# Altium footprint library PcbLib1.PcbLib: 23 footprints (part 2 of 2)
Each footprint in its own frame and in the unit in brackets; x right, y up, seen from the top. Pads: shape width x height; smd on the part's side, far side on the other; paste and mask are expansions set on the pad; w line width, h text height; cw(c..) or ccw(c..) is an arc to the next point about the centre after c.
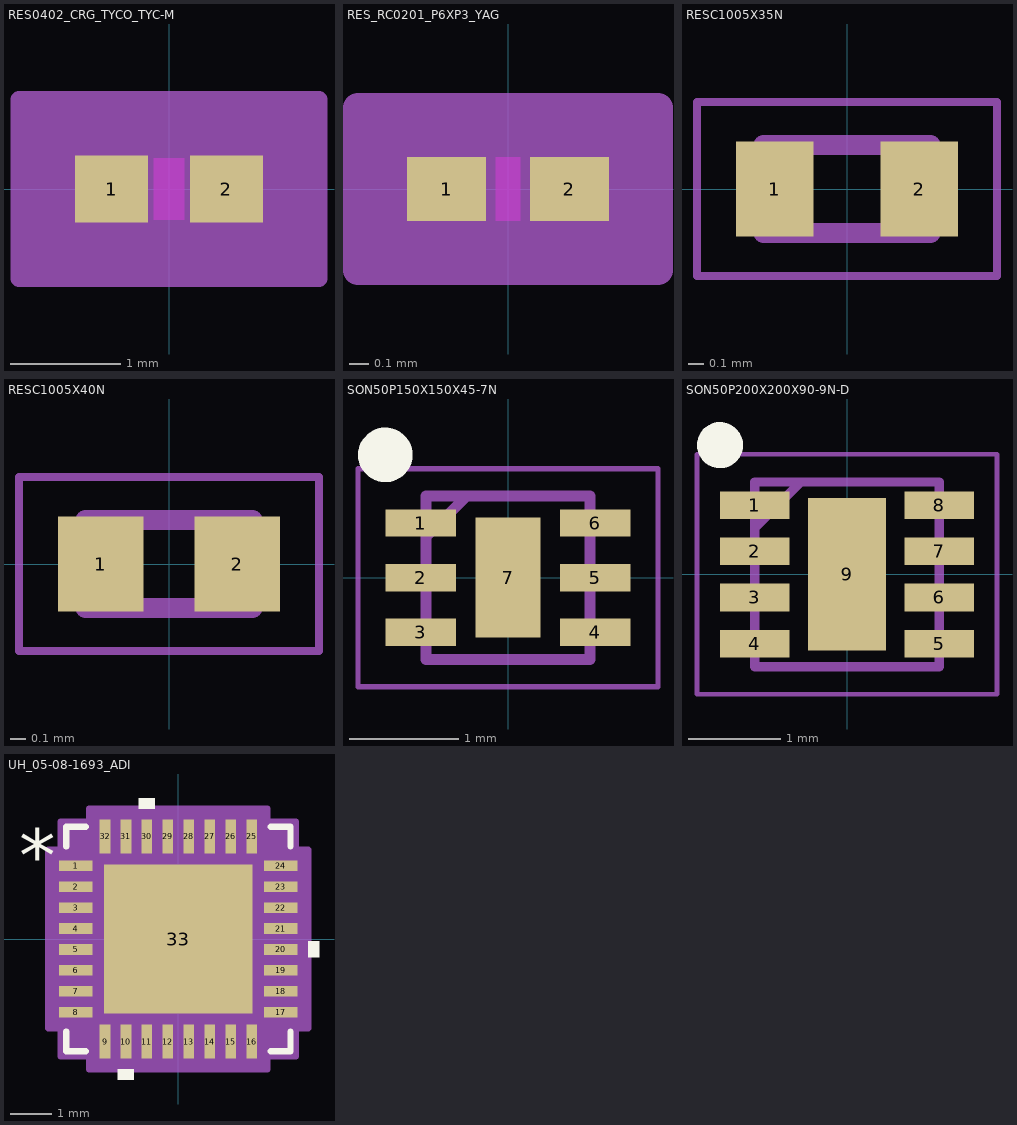
[diagram p1: the footprints below, top view; thin cyan lines are the x and y axes]

## RES0402_CRG_TYCO_TYC-M [mil]
pads (2):
  rect 26x24 smd paste+0 mask+0: 1(-20.5,0) 2(20.5,0)
Top Layer keep-out:
  region: -5.5,-9 -5.5,9 5.5,9 5.5,-9
Top Overlay:
  text ".Designator" at -137.5,-25 h50
Keep-Out Layer:
  region: -5.5,-11 -5.5,11 5.5,11 5.5,-11
Top 3D Body:
  lines w1: -21.5,-11 -21.5,11 ; -21.5,-11 21.5,-11 ; -21.5,-11 -7.5,-11 -7.5,11 -21.5,11 ; -21.5,-11 -21.5,11 ; -21.5,11 21.5,11 ; 21.5,-11 21.5,11 ; 21.5,-11 21.5,11 ; 21.5,-11 7.5,-11 7.5,11 21.5,11
  text ".Designator" at -137.5,-25 h50
Mechanical 15:
  region: 53.5,-32 -53.5,-32 -53.5,32 53.5,32
  lines w6: -53.5,-32 53.5,-32 53.5,32 -53.5,32 -53.5,-32
3D body "RES0402_CRG_TYCO_TYC.step": height 15.98, standoff 0, extent -21.5,-10.98 21.5,10.98

## RES_RC0201_P6XP3_YAG [mil]
pads (2):
  rect 16x13 smd paste+0 mask+0: 1(-12.5,0) 2(12.5,0)
Top Layer keep-out:
  region: -2.5,-4.5 -2.5,4.5 2.5,4.5 2.5,-4.5
Top Overlay:
  text ".Designator" at -137.5,-25 h50
Keep-Out Layer:
  region: -2.5,-6.5 -2.5,6.5 2.5,6.5 2.5,-6.5
Top 3D Body:
  lines w1: -12.5,-6.5 -12.5,6.5 ; -12.5,-6.5 -4.5,-6.5 -4.5,6.5 -12.5,6.5 ; -12.5,-6.5 12.5,-6.5 ; -12.5,-6.5 -12.5,6.5 ; -12.5,6.5 12.5,6.5 ; 12.5,-6.5 4.5,-6.5 4.5,6.5 12.5,6.5 ; 12.5,-6.5 12.5,6.5 ; 12.5,-6.5 12.5,6.5
  text ".Designator" at -137.5,-25 h50
Mechanical 15:
  region: 30.5,-16.5 -30.5,-16.5 -30.5,16.5 30.5,16.5
  lines w6: -30.5,-16.5 -30.5,16.5 30.5,16.5 30.5,-16.5 -30.5,-16.5
3D body "RES_RC0201_P6XP3_YAG.step": height 10, standoff 0, extent -12.52,-6.5 12.52,6.5

## RESC1005X35N [mm]
pads (2):
  rect 0.49x0.6 smd paste+0 mask+0.102: 1(-0.457,0) 2(0.457,0)
Top 3D Body:
  lines w0.127: -0.53,-0.28 0.53,-0.28 0.53,0.28 -0.53,0.28 -0.53,-0.28
Mechanical 15:
  lines w0.05: -0.95,-0.55 0.95,-0.55 0.95,0.55 -0.95,0.55 -0.95,-0.55

## RESC1005X40N [mm]
pads (2):
  rect 0.54x0.6 smd paste+0 mask+0.102: 1(-0.432,0) 2(0.432,0)
Top 3D Body:
  lines w0.127: -0.53,-0.28 -0.53,0.28 0.53,0.28 0.53,-0.28 -0.53,-0.28
Mechanical 15:
  lines w0.05: -0.95,-0.55 -0.95,0.55 0.95,0.55 0.95,-0.55 -0.95,-0.55
3D body "step_temp.STEP": height 0.4, standoff 0, extent -0.5,-0.25 0.5,0.25

## SON50P150X150X45-7N [mm]
pads (7):
  rect 0.65x0.25 smd: 1(-0.8,0.5) 2(-0.8,0) 3(-0.8,-0.5) 4(0.8,-0.5) 5(0.8,0) 6(0.8,0.5)
  rect 0.6x1.1 smd: 7(0,0)
Top Overlay:
  circle w0.25: c-1.125,1.125 r0.125
Mechanical 15:
  lines w0.1: -0.75,0.375 -0.375,0.75 ; -0.75,-0.75 0.75,-0.75 0.75,0.75 -0.75,0.75 -0.75,-0.75
Mechanical 20:
  lines w0.05: -1.375,-1 1.375,-1 1.375,1 -1.375,1 -1.375,-1

## SON50P200X200X90-9N-D [mm]
pads (9):
  rect 0.75x0.3 smd: 1(-1,0.75) 2(-1,0.25) 3(-1,-0.25) 4(-1,-0.75) 5(1,-0.75) 6(1,-0.25) 7(1,0.25) 8(1,0.75)
  rect 0.85x1.65 smd: 9(0,0)
Top Overlay:
  circle w0.25: c-1.375,1.4 r0.125
Mechanical 15:
  lines w0.1: -1,0.5 -0.5,1 ; -1,-1 1,-1 1,1 -1,1 -1,-1
Mechanical 20:
  lines w0.05: -1.625,-1.3 1.625,-1.3 1.625,1.3 -1.625,1.3 -1.625,-1.3

## UH_05-08-1693_ADI [mil]
pads (33):
  rect 31.81x10.03 smd paste+0 mask+0: 1(-96.41,68.92) 2(-96.41,49.23) 3(-96.41,29.54) 4(-96.41,9.85) 5(-96.41,-9.85) 6(-96.41,-29.54) 7(-96.41,-49.23) 8(-96.41,-68.92) 17(96.41,-68.92) 18(96.41,-49.23) 19(96.41,-29.54) 20(96.41,-9.85) 21(96.41,9.85) 22(96.41,29.54) 23(96.41,49.23) 24(96.41,68.92)
  rect 10.03x31.81 smd paste+0 mask+0: 9(-68.92,-96.41) 10(-49.23,-96.41) 11(-29.54,-96.41) 12(-9.85,-96.41) 13(9.85,-96.41) 14(29.54,-96.41) 15(49.23,-96.41) 16(68.92,-96.41) 25(68.92,96.41) 26(49.23,96.41) 27(29.54,96.41) 28(9.85,96.41) 29(-9.85,96.41) 30(-29.54,96.41) 31(-49.23,96.41) 32(-68.92,96.41)
  rect 140x140 smd paste-70 mask+0: 33(0,0)
Top Overlay:
  region: -41.73,-122.31 -56.73,-122.31 -56.73,-132.31 -41.73,-132.31
  region: 122.31,-2.35 132.31,-2.35 132.31,-17.34 122.31,-17.34
  region: -22.04,122.31 -37.03,122.31 -37.03,132.31 -22.04,132.31
  lines w6: -105.5,-87.03 -105.5,-105.5 -87.03,-105.5 ; -105.5,87.03 -105.5,105.5 -87.03,105.5 ; 87.03,-105.5 105.5,-105.5 105.5,-87.03 ; 87.03,105.5 105.5,105.5 105.5,87.03
  text "*" at -149.81,53.76 h50
  text ".Designator" at -137.5,-25 h50
Top Paste:
  region: -3.94,66.06 -66.06,66.06 -66.06,3.94 -3.94,3.94
  region: -3.94,-3.94 -66.06,-3.94 -66.06,-66.06 -3.94,-66.06
  region: 66.06,66.06 3.94,66.06 3.94,3.94 66.06,3.94
  region: 66.06,-3.94 3.94,-3.94 3.94,-66.06 66.06,-66.06
Top 3D Body:
  lines w1: -100.5,50.5 -50.5,100.5 ; -100.5,-100.5 100.5,-100.5 100.5,100.5 -100.5,100.5 -100.5,-100.5 ; -100.5,-74.92 -100.5,-62.91 -100.5,-74.92 ; -100.5,-55.23 -100.5,-43.23 -100.5,-55.23 ; -100.5,-35.53 -100.5,-23.54 -100.5,-35.53 ; -100.5,-15.85 -100.5,-3.85 -100.5,-15.85 ; -100.5,3.85 -100.5,15.85 -100.5,3.85 ; -100.5,23.54 -100.5,35.53 -100.5,23.54 ; -100.5,43.23 -100.5,55.23 -100.5,43.23 ; -100.5,62.91 -100.5,74.92 -100.5,62.91 ; -74.92,-100.5 -62.91,-100.5 -74.92,-100.5 ; -74.92,100.5 -62.91,100.5 -74.92,100.5 ; -55.23,-100.5 -43.23,-100.5 -55.23,-100.5 ; -55.23,100.5 -43.23,100.5 -55.23,100.5 ; -35.53,-100.5 -23.54,-100.5 -35.53,-100.5 ; -35.53,100.5 -23.54,100.5 -35.53,100.5 ; -15.85,-100.5 -3.85,-100.5 -15.85,-100.5 ; -15.85,100.5 -3.85,100.5 -15.85,100.5 ; 3.85,-100.5 15.85,-100.5 3.85,-100.5 ; 3.85,100.5 15.85,100.5 3.85,100.5 ; 23.54,-100.5 35.53,-100.5 23.54,-100.5 ; 23.54,100.5 35.53,100.5 23.54,100.5 ; 43.23,-100.5 55.23,-100.5 43.23,-100.5 ; 43.23,100.5 55.23,100.5 43.23,100.5 ; 62.91,-100.5 74.92,-100.5 62.91,-100.5 ; 62.91,100.5 74.92,100.5 62.91,100.5 ; 100.5,-74.92 100.5,-62.91 100.5,-74.92 ; 100.5,-55.23 100.5,-43.23 100.5,-55.23 ; 100.5,-35.53 100.5,-23.54 100.5,-35.53 ; 100.5,-15.85 100.5,-3.85 100.5,-15.85 ; 100.5,3.85 100.5,15.85 100.5,3.85 ; 100.5,23.54 100.5,35.53 100.5,23.54 ; 100.5,43.23 100.5,55.23 100.5,43.23 ; 100.5,62.91 100.5,74.92 100.5,62.91
  text ".Designator" at -137.5,-25 h50
  text "*" at -93,53.76 h50
Mechanical 15:
  region: -83.93,-110.5 -110.5,-110.5 -110.5,-83.93 -122.31,-83.93 -122.31,83.93 -110.5,83.93 -110.5,110.5 -83.93,110.5 -83.93,122.31 83.93,122.31 83.93,110.5 110.5,110.5 110.5,83.93 122.31,83.93 122.31,-83.93 110.5,-83.93 110.5,-110.5 83.93,-110.5 83.93,-122.31 -83.93,-122.31
  lines w6: -122.31,-83.93 -110.5,-83.93 -110.5,-110.5 -83.93,-110.5 -83.93,-122.31 83.93,-122.31 83.93,-110.5 110.5,-110.5 110.5,-83.93 122.31,-83.93 122.31,83.93 110.5,83.93 110.5,110.5 83.93,110.5 83.93,122.31 -83.93,122.31 -83.93,110.5 -110.5,110.5 -110.5,83.93 -122.31,83.93 -122.31,-83.93
3D body "UH_05-08-1693_ADI.step": height 32.09, standoff 0, extent -100.51,-100.51 100.51,100.51